# EAGLE library part 6200XX11821_62003211821 (library WR-PHD)
WR-PHD 2.00 mm Socket Header Article Properties Pins 2 unitless; 4 unitless; 6 unitless; 8 unitless; 10 unitless; 20 unitless; 32 unitless General Information Operating Temperature -40 °C up to +105 °C Compliance Lead free / RoHS Pitch 2 mm Durability 50 Cycles Rows Single Gender Socket Header Type Straight Material Properties Insulator Material PA9T Insulator Flammability Rating UL94 V-0 Contact Material Copper Alloy Contact Plating Gold Contact Type Stamped Certification UL Approval E323964 Packaging Properties Packaging Tube Electrical Properties IR 2 A Withstanding Voltage 500 V (AC) Contact Resistance 20 mΩ RISO 1000 MΩ <https://www.we-online.com/components/media/o33220v209%20Family_WR-PHD_6200xx11821.jpg> Details see: www.we-online.com/en/components/products/PHD_2_00_SOCKET_HEADER_6200XX11821 <www.we-online.com/catalog/PHD_2_00_SOCKET_HEADER_6200XX11821/?utm_source=eagle_model&utm_medium=description_link&utm_campaign=eisos_eagle> Updated by Ella 2024-01-31 2024 (C) Würth Elektronik
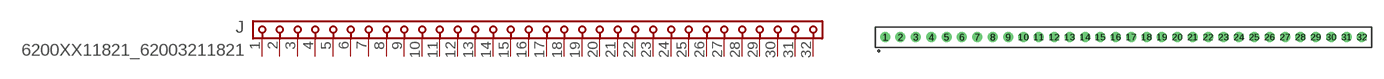
[diagram p356: symbol with the pads of 62003211821; footprint 62003211821]

Designator prefix J

## 6200XX11821_62003211821 (DATASHEET-URL: https://www.we-online.com/redexpert/spec/62003211821?ae; GENDER: Socket Header; IR: 2A; MOUNT: THT; PACKAGING: Tube; PART-NUMBER: 62003211821; PINS: 32; PITCH: 2.00 mm; ROWS: Single; TYPE: Straight; VALUE: 62003211821)  [62003211821]
1  1  pas
2  2  pas
3  3  pas
4  4  pas
5  5  pas
6  6  pas
7  7  pas
8  8  pas
9  9  pas
10  10  pas
11  11  pas
12  12  pas
13  13  pas
14  14  pas
15  15  pas
16  16  pas
17  17  pas
18  18  pas
19  19  pas
20  20  pas
21  21  pas
22  22  pas
23  23  pas
24  24  pas
25  25  pas
26  26  pas
27  27  pas
28  28  pas
29  29  pas
30  30  pas
31  31  pas
32  32  pas

## Footprint 62003211821 (pad centres in mm)
WR-PHD 2.00 mm Socket Header 32p, 1 row, straight, gold plating;
drill 0.8: 1 -31,0; 2 -29,0; 3 -27,0; 4 -25,0; 5 -23,0; 6 -21,0; 7 -19,0; 8 -17,0; 9 -15,0; 10 -13,0; 11 -11,0; 12 -9,0; 13 -7,0; 14 -5,0; 15 -3,0; 16 -1,0; 17 1,0; 18 3,0; 19 5,0; 20 7,0; 21 9,0; 22 11,0; 23 13,0; 24 15,0; 25 17,0; 26 19,0; 27 21,0; 28 23,0; 29 25,0; 30 27,0; 31 29,0; 32 31,0